# Altium footprint library Footprints.PcbLib: 67 footprints (part 5 of 5)
Each footprint in its own frame and in the unit in brackets; x right, y up, seen from the top. Pads: shape width x height; smd on the part's side, far side on the other; paste and mask are expansions set on the pad; w line width, h text height; cw(c..) or ccw(c..) is an arc to the next point about the centre after c.
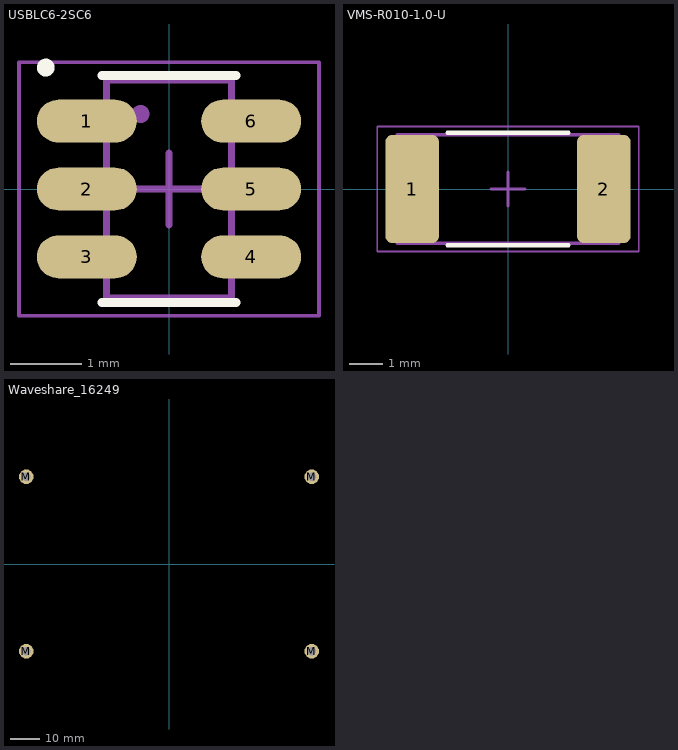
[diagram p4: the footprints below, top view; thin cyan lines are the x and y axes]

## USBLC6-2SC6 [mm] "SOT23, 6-Leads, Body 2.93x2.80mm, Pitch 0.95mm, IPC Medium Density"
height 1.45
pads (6):
  oval 1.4x0.6 smd: 1(-1.15,0.95) 2(-1.15,0) 3(-1.15,-0.95) 4(1.15,-0.95) 5(1.15,0) 6(1.15,0.95)
Top Overlay:
  circle w0.125: c-1.725,1.7 r0.062
  lines w0.127: -0.938,-1.588 0.938,-1.588 ; -0.938,1.589 0.938,1.589
Top Courtyard:
  lines w0.05: -2.1,-1.775 -2.1,1.775 2.1,1.775 2.1,-1.775 -2.1,-1.775
Top Assembly:
  circle w0.125: c-0.4,1.05 r0.062
  lines w0.1: -0.875,-1.525 -0.875,1.525 0.875,1.525 0.875,-1.525 -0.875,-1.525
Top Designator:
  text ".Designator" at -2.247,-0.225 h1
Top Component Center:
  lines w0.1: -0.5,0 0.5,0 ; 0,-0.5 0,0.5
3D body "USBLC6-2SC6.step": height 1.45, standoff 0, extent -1.5,-1.462 1.5,1.462

## VMS-R010-1.0-U [mm] "Chip Resistor, 2-Leads, Body 6.35x3.05mm, IPC Medium Density"
height 0.55
pads (2):
  rrect25% 1.6x3.25 smd: 1(-2.875,0) 2(2.875,0)
Top Overlay:
  lines w0.127: -1.812,-1.689 1.812,-1.689 ; -1.812,1.689 1.812,1.689
Top Courtyard:
  lines w0.05: -3.925,-1.875 -3.925,1.875 3.925,1.875 3.925,-1.875 -3.925,-1.875
Top Assembly:
  lines w0.1: -3.325,-1.625 -3.325,1.625 3.325,1.625 3.325,-1.625 -3.325,-1.625
Top Designator:
  text ".Designator" at -2.247,-0.225 h1
Top Component Center:
  lines w0.1: -0.5,0 0.5,0 ; 0,-0.5 0,0.5
3D body "VMS-R010-1.0-U.step": height 0.55, standoff 0, extent -3.175,-1.525 3.175,1.525

## Waveshare_16249 [mm]
pads (4):
  round 5 hole 3: M(-49.09,-30) M(-49.09,30) M(49.09,-30) M(49.09,30)
3D body "16249.step": height 20.45, standoff 0.05, extent -53,-33.95 53,33.95